# Altium footprint library LTVS16H50ET5G.PcbLib: 1 footprints
Each footprint in its own frame and in the unit in brackets; x right, y up, seen from the top. Pads: shape width x height; smd on the part's side, far side on the other; paste and mask are expansions set on the pad; w line width, h text height; cw(c..) or ccw(c..) is an arc to the next point about the centre after c.
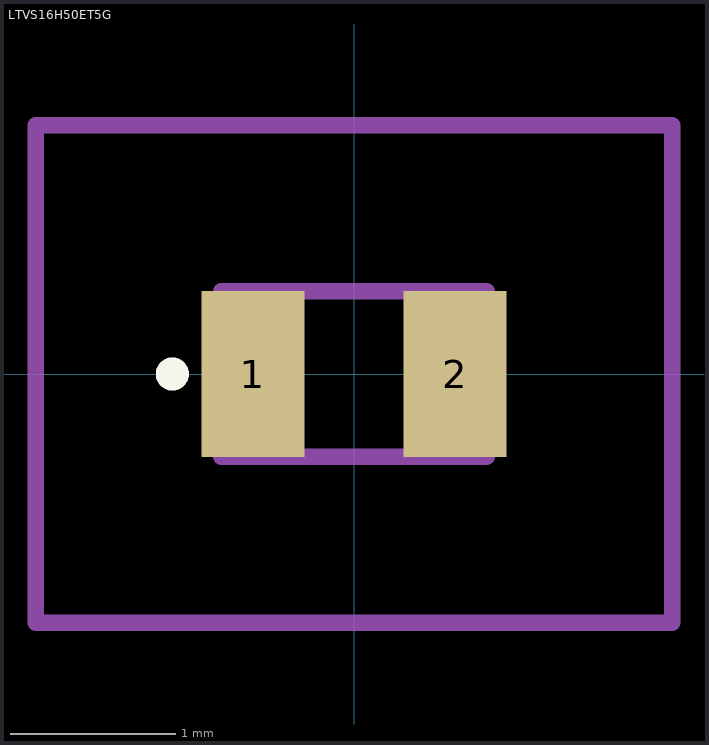
[diagram p0: the footprint, top view; thin cyan lines are the x and y axes]

## LTVS16H50ET5G [mm]
pads (2):
  rect 0.62x1 smd: 1(-0.61,0) 2(0.61,0)
Top Overlay:
  lines w0.1: -1.146,0 ccw(c-1.096,0) -1.046,0 ; -1.146,0 cw(c-1.096,0) -1.046,0 ; -1.146,0 ccw(c-1.096,0) -1.046,0
Mechanical 15:
  lines w0.1: -0.8,-0.5 0.8,-0.5 0.8,0.5 -0.8,0.5 -0.8,-0.5
Mechanical 20:
  lines w0.1: -1.92,-1.5 1.92,-1.5 1.92,1.5 -1.92,1.5 -1.92,-1.5
3D body "LTVS16H5.0ET5G_DFN1610-2_approx.step": height 0.47, standoff 0, extent -0.8,-0.5 0.8,0.5